# Altium footprint library Connector-PinHDR.PcbLib: 88 footprints (part 5 of 6)
Each footprint in its own frame and in the unit in brackets; x right, y up, seen from the top. Pads: shape width x height; smd on the part's side, far side on the other; paste and mask are expansions set on the pad; w line width, h text height; cw(c..) or ccw(c..) is an arc to the next point about the centre after c.
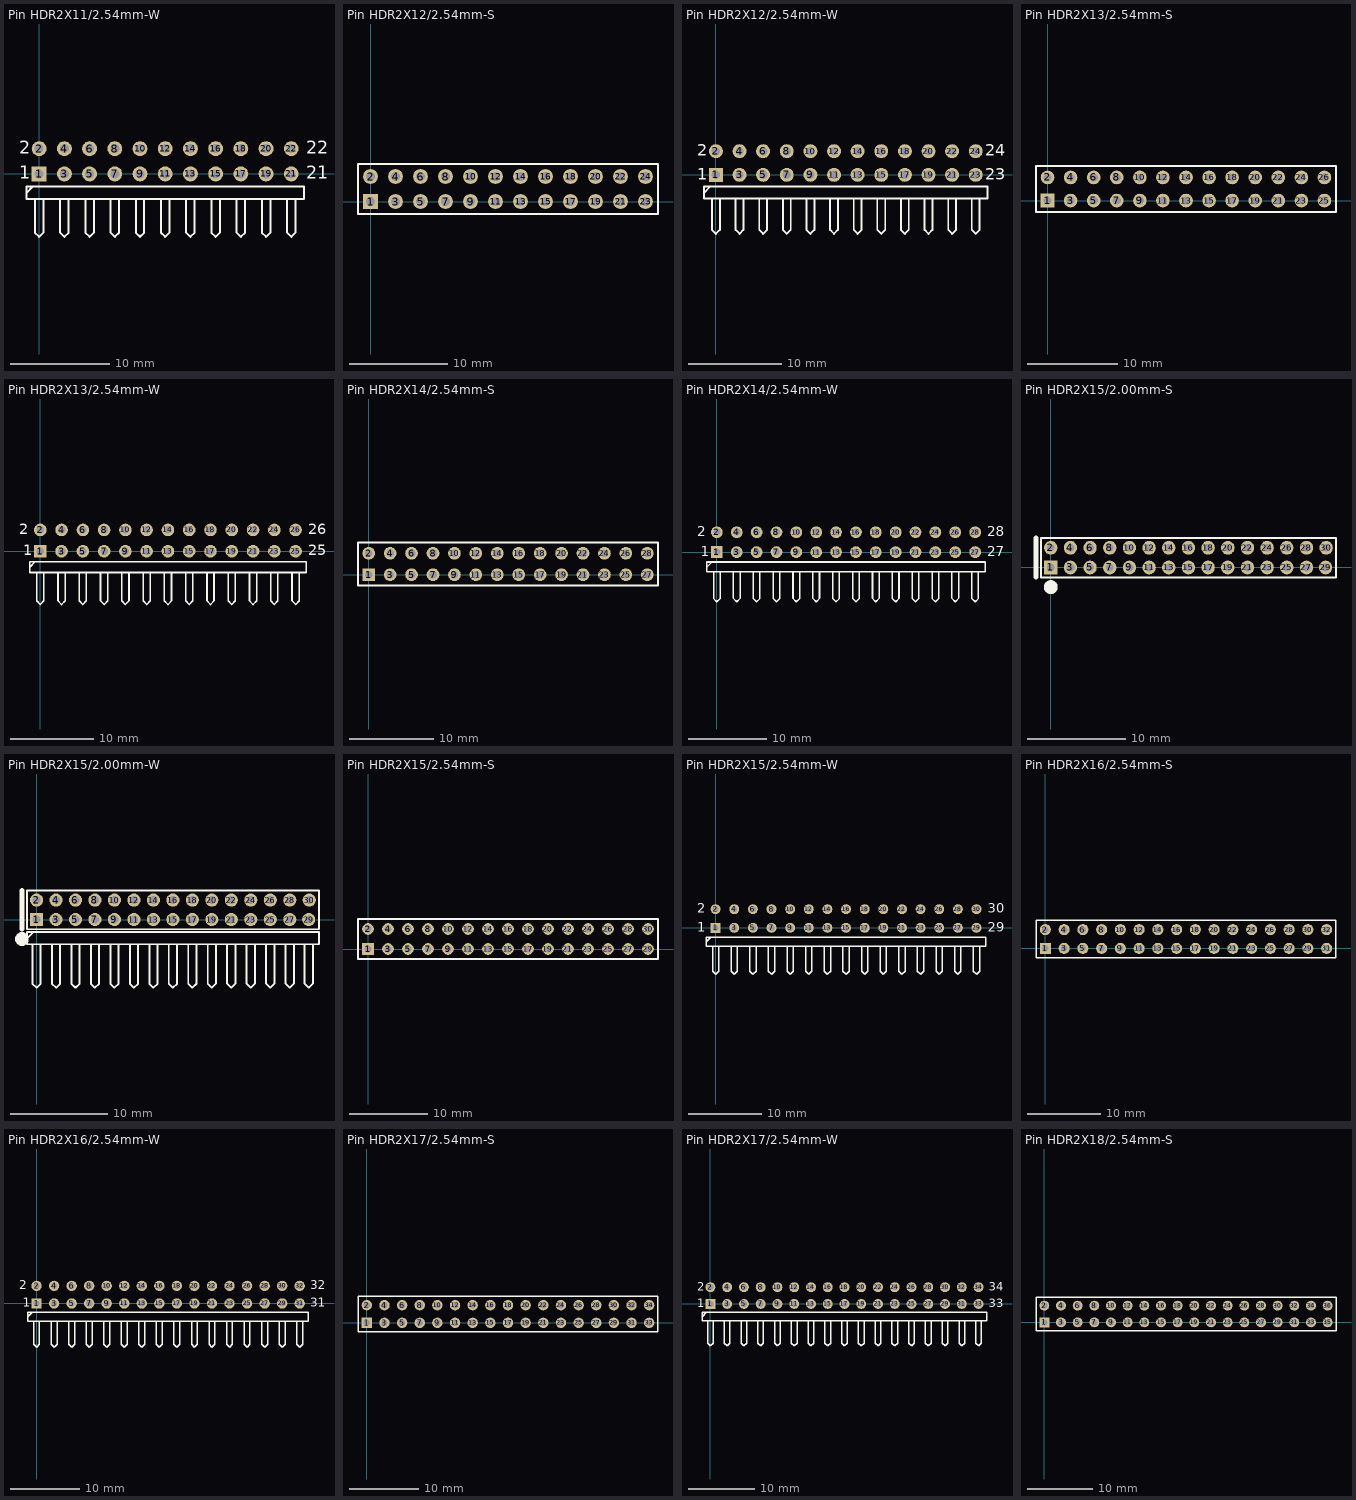
[diagram p4: the footprints below, top view; thin cyan lines are the x and y axes]

## Pin HDR2X11/2.54mm-W [mm] "Connector; Header; 11x2 Position; Right Angle"
pads (22):
  rect 1.5x1.5 hole 0.9: 1(0,0)
  round 1.5 hole 0.9: 2(0,2.54) 3(2.54,0) 4(2.54,2.54) 5(5.08,0) 6(5.08,2.54) 7(7.62,0) 8(7.62,2.54) 9(10.16,0) 10(10.16,2.54) 11(12.7,0) 12(12.7,2.54) 13(15.24,0) 14(15.24,2.54) 15(17.78,0) 16(17.78,2.54) 17(20.32,0) 18(20.32,2.54) 19(22.86,0) 20(22.86,2.54) 21(25.4,0) 22(25.4,2.54)
Top Overlay:
  lines w0.2: -1.27,-1.905 -0.635,-1.27 ; -0.423,-2.54 -0.423,-5.927 0,-6.35 0.423,-5.927 0.423,-2.54 ; 2.117,-2.54 2.117,-5.927 2.54,-6.35 2.963,-5.927 2.963,-2.54 ; 4.657,-2.54 4.657,-5.927 5.08,-6.35 5.503,-5.927 5.503,-2.54 ; 7.197,-2.54 7.197,-5.927 7.62,-6.35 8.043,-5.927 8.043,-2.54 ; 9.737,-2.54 9.737,-5.927 10.16,-6.35 10.583,-5.927 10.583,-2.54 ; 12.277,-2.54 12.277,-5.927 12.7,-6.35 13.123,-5.927 13.123,-2.54 ; 14.817,-2.54 14.817,-5.927 15.24,-6.35 15.663,-5.927 15.663,-2.54 ; 17.357,-2.54 17.357,-5.927 17.78,-6.35 18.203,-5.927 18.203,-2.54 ; 19.897,-2.54 19.897,-5.927 20.32,-6.35 20.743,-5.927 20.743,-2.54 ; 22.437,-2.54 22.437,-5.927 22.86,-6.35 23.283,-5.927 23.283,-2.54 ; 24.977,-2.54 24.977,-5.927 25.4,-6.35 25.823,-5.927 25.823,-2.54 ; -1.27,-2.54 -1.27,-1.27 26.67,-1.27 26.67,-2.54 -1.27,-2.54
  text "22" at 26.924,2.032 h1.27
  text "21" at 26.924,-0.508 h1.27
  text "1" at -2.032,-0.508 h1.27
  text "2" at -2.032,2.032 h1.27
3D body "hdr2_11.stp": height 5.08, standoff -1, extent -1.27,-10.001 26.67,2.889

## Pin HDR2X12/2.54mm-S [mm] "Connector; Header; 12x2 Position"
pads (24):
  rect 1.5x1.5 hole 0.9: 1(0,0)
  round 1.5 hole 0.9: 2(0,2.54) 3(2.54,0) 4(2.54,2.54) 5(5.08,0) 6(5.08,2.54) 7(7.62,0) 8(7.62,2.54) 9(10.16,0) 10(10.16,2.54) 11(12.7,0) 12(12.7,2.54) 13(15.24,0) 14(15.24,2.54) 15(17.78,0) 16(17.78,2.54) 17(20.32,0) 18(20.32,2.54) 19(22.86,0) 20(22.86,2.54) 21(25.4,0) 22(25.4,2.54) 23(27.94,0) 24(27.94,2.54)
Top Overlay:
  lines w0.2: -1.27,-1.27 -1.27,3.81 29.21,3.81 29.21,-1.27 -1.27,-1.27
3D body "HEADER.STEP": height 7.58, standoff -2.94, extent 26.67,1.27 29.21,3.81
3D body "HEADER.STEP": height 7.58, standoff -2.94, extent 26.67,-1.27 29.21,1.27
3D body "HEADER.STEP": height 7.58, standoff -2.94, extent 24.13,1.27 26.67,3.81
3D body "HEADER.STEP": height 7.58, standoff -2.94, extent 24.13,-1.27 26.67,1.27
3D body "HEADER.STEP": height 7.58, standoff -2.94, extent 21.59,1.27 24.13,3.81
3D body "HEADER.STEP": height 7.58, standoff -2.94, extent 21.59,-1.27 24.13,1.27
3D body "HEADER.STEP": height 7.58, standoff -2.94, extent 19.05,1.27 21.59,3.81
3D body "HEADER.STEP": height 7.58, standoff -2.94, extent 19.05,-1.27 21.59,1.27
3D body "HEADER.STEP": height 7.58, standoff -2.94, extent 16.51,1.27 19.05,3.81
3D body "HEADER.STEP": height 7.58, standoff -2.94, extent 16.51,-1.27 19.05,1.27
3D body "HEADER.STEP": height 7.58, standoff -2.94, extent 13.97,1.27 16.51,3.81
3D body "HEADER.STEP": height 7.58, standoff -2.94, extent 13.97,-1.27 16.51,1.27
3D body "HEADER.STEP": height 7.58, standoff -2.94, extent 11.43,1.27 13.97,3.81
3D body "HEADER.STEP": height 7.58, standoff -2.94, extent 11.43,-1.27 13.97,1.27
3D body "HEADER.STEP": height 7.58, standoff -2.94, extent 8.89,1.27 11.43,3.81
3D body "HEADER.STEP": height 7.58, standoff -2.94, extent 8.89,-1.27 11.43,1.27
3D body "HEADER.STEP": height 7.58, standoff -2.94, extent 6.35,1.27 8.89,3.81
3D body "HEADER.STEP": height 7.58, standoff -2.94, extent 6.35,-1.27 8.89,1.27
3D body "HEADER.STEP": height 7.58, standoff -2.94, extent 3.81,1.27 6.35,3.81
3D body "HEADER.STEP": height 7.58, standoff -2.94, extent 3.81,-1.27 6.35,1.27
3D body "HEADER.STEP": height 7.58, standoff -2.94, extent 1.27,1.27 3.81,3.81
3D body "HEADER.STEP": height 7.58, standoff -2.94, extent 1.27,-1.27 3.81,1.27
3D body "HEADER.STEP": height 7.58, standoff -2.94, extent -1.27,1.27 1.27,3.81
3D body "HEADER.STEP": height 7.58, standoff -2.94, extent -1.27,-1.27 1.27,1.27

## Pin HDR2X12/2.54mm-W [mm] "Connector; Header; 12x2 Position; Right Angle"
pads (24):
  rect 1.5x1.5 hole 0.9: 1(0,0)
  round 1.5 hole 0.9: 2(0,2.54) 3(2.54,0) 4(2.54,2.54) 5(5.08,0) 6(5.08,2.54) 7(7.62,0) 8(7.62,2.54) 9(10.16,0) 10(10.16,2.54) 11(12.7,0) 12(12.7,2.54) 13(15.24,0) 14(15.24,2.54) 15(17.78,0) 16(17.78,2.54) 17(20.32,0) 18(20.32,2.54) 19(22.86,0) 20(22.86,2.54) 21(25.4,0) 22(25.4,2.54) 23(27.94,0) 24(27.94,2.54)
Top Overlay:
  lines w0.2: -1.27,-1.905 -0.635,-1.27 ; -0.423,-2.54 -0.423,-5.927 0,-6.35 0.423,-5.927 0.423,-2.54 ; 2.117,-2.54 2.117,-5.927 2.54,-6.35 2.963,-5.927 2.963,-2.54 ; 4.657,-2.54 4.657,-5.927 5.08,-6.35 5.503,-5.927 5.503,-2.54 ; 7.197,-2.54 7.197,-5.927 7.62,-6.35 8.043,-5.927 8.043,-2.54 ; 9.737,-2.54 9.737,-5.927 10.16,-6.35 10.583,-5.927 10.583,-2.54 ; 12.277,-2.54 12.277,-5.927 12.7,-6.35 13.123,-5.927 13.123,-2.54 ; 14.817,-2.54 14.817,-5.927 15.24,-6.35 15.663,-5.927 15.663,-2.54 ; 17.357,-2.54 17.357,-5.927 17.78,-6.35 18.203,-5.927 18.203,-2.54 ; 19.897,-2.54 19.897,-5.927 20.32,-6.35 20.743,-5.927 20.743,-2.54 ; 22.437,-2.54 22.437,-5.927 22.86,-6.35 23.283,-5.927 23.283,-2.54 ; 24.977,-2.54 24.977,-5.927 25.4,-6.35 25.823,-5.927 25.823,-2.54 ; 27.517,-2.54 27.517,-5.927 27.94,-6.35 28.363,-5.927 28.363,-2.54 ; -1.27,-2.54 29.21,-2.54 29.21,-1.27 -1.27,-1.27 -1.27,-2.54
  text "1" at -2.032,-0.508 h1.27
  text "2" at -2.032,2.032 h1.27
  text "23" at 28.956,-0.508 h1.27
  text "24" at 28.956,2.032 h1.27
3D body "hdr2_12.stp": height 5.08, standoff -1, extent -1.27,-10.001 29.21,2.889

## Pin HDR2X13/2.54mm-S [mm] "Connector; Header; 13x2 Position"
pads (26):
  rect 1.5x1.5 hole 0.9: 1(0,0)
  round 1.5 hole 0.9: 2(0,2.54) 3(2.54,0) 4(2.54,2.54) 5(5.08,0) 6(5.08,2.54) 7(7.62,0) 8(7.62,2.54) 9(10.16,0) 10(10.16,2.54) 11(12.7,0) 12(12.7,2.54) 13(15.24,0) 14(15.24,2.54) 15(17.78,0) 16(17.78,2.54) 17(20.32,0) 18(20.32,2.54) 19(22.86,0) 20(22.86,2.54) 21(25.4,0) 22(25.4,2.54) 23(27.94,0) 24(27.94,2.54) 25(30.48,0) 26(30.48,2.54)
Top Overlay:
  lines w0.2: -1.27,-1.27 -1.27,3.81 31.75,3.81 31.75,-1.27 -1.27,-1.27
3D body "HEADER.STEP": height 7.58, standoff -2.94, extent -1.27,1.27 1.27,3.81
3D body "HEADER.STEP": height 7.58, standoff -2.94, extent -1.27,-1.27 1.27,1.27
3D body "HEADER.STEP": height 7.58, standoff -2.94, extent 1.27,1.27 3.81,3.81
3D body "HEADER.STEP": height 7.58, standoff -2.94, extent 1.27,-1.27 3.81,1.27
3D body "HEADER.STEP": height 7.58, standoff -2.94, extent 3.81,1.27 6.35,3.81
3D body "HEADER.STEP": height 7.58, standoff -2.94, extent 3.81,-1.27 6.35,1.27
3D body "HEADER.STEP": height 7.58, standoff -2.94, extent 6.35,1.27 8.89,3.81
3D body "HEADER.STEP": height 7.58, standoff -2.94, extent 6.35,-1.27 8.89,1.27
3D body "HEADER.STEP": height 7.58, standoff -2.94, extent 8.89,1.27 11.43,3.81
3D body "HEADER.STEP": height 7.58, standoff -2.94, extent 8.89,-1.27 11.43,1.27
3D body "HEADER.STEP": height 7.58, standoff -2.94, extent 11.43,1.27 13.97,3.81
3D body "HEADER.STEP": height 7.58, standoff -2.94, extent 11.43,-1.27 13.97,1.27
3D body "HEADER.STEP": height 7.58, standoff -2.94, extent 13.97,1.27 16.51,3.81
3D body "HEADER.STEP": height 7.58, standoff -2.94, extent 13.97,-1.27 16.51,1.27
3D body "HEADER.STEP": height 7.58, standoff -2.94, extent 16.51,1.27 19.05,3.81
3D body "HEADER.STEP": height 7.58, standoff -2.94, extent 16.51,-1.27 19.05,1.27
3D body "HEADER.STEP": height 7.58, standoff -2.94, extent 19.05,1.27 21.59,3.81
3D body "HEADER.STEP": height 7.58, standoff -2.94, extent 19.05,-1.27 21.59,1.27
3D body "HEADER.STEP": height 7.58, standoff -2.94, extent 21.59,1.27 24.13,3.81
3D body "HEADER.STEP": height 7.58, standoff -2.94, extent 21.59,-1.27 24.13,1.27
3D body "HEADER.STEP": height 7.58, standoff -2.94, extent 24.13,1.27 26.67,3.81
3D body "HEADER.STEP": height 7.58, standoff -2.94, extent 24.13,-1.27 26.67,1.27
3D body "HEADER.STEP": height 7.58, standoff -2.94, extent 26.67,1.27 29.21,3.81
3D body "HEADER.STEP": height 7.58, standoff -2.94, extent 26.67,-1.27 29.21,1.27
3D body "HEADER.STEP": height 7.58, standoff -2.94, extent 29.21,1.27 31.75,3.81
3D body "HEADER.STEP": height 7.58, standoff -2.94, extent 29.21,-1.27 31.75,1.27

## Pin HDR2X13/2.54mm-W [mm] "Connector; Header; 13x2 Position; Right Angle"
pads (26):
  rect 1.5x1.5 hole 0.9: 1(0,0)
  round 1.5 hole 0.9: 2(0,2.54) 3(2.54,0) 4(2.54,2.54) 5(5.08,0) 6(5.08,2.54) 7(7.62,0) 8(7.62,2.54) 9(10.16,0) 10(10.16,2.54) 11(12.7,0) 12(12.7,2.54) 13(15.24,0) 14(15.24,2.54) 15(17.78,0) 16(17.78,2.54) 17(20.32,0) 18(20.32,2.54) 19(22.86,0) 20(22.86,2.54) 21(25.4,0) 22(25.4,2.54) 23(27.94,0) 24(27.94,2.54) 25(30.48,0) 26(30.48,2.54)
Top Overlay:
  lines w0.2: -1.27,-1.905 -0.635,-1.27 ; -0.423,-2.54 -0.423,-5.927 0,-6.35 0.423,-5.927 0.423,-2.54 ; 2.117,-2.54 2.117,-5.927 2.54,-6.35 2.963,-5.927 2.963,-2.54 ; 4.657,-2.54 4.657,-5.927 5.08,-6.35 5.503,-5.927 5.503,-2.54 ; 7.197,-2.54 7.197,-5.927 7.62,-6.35 8.043,-5.927 8.043,-2.54 ; 9.737,-2.54 9.737,-5.927 10.16,-6.35 10.583,-5.927 10.583,-2.54 ; 12.277,-2.54 12.277,-5.927 12.7,-6.35 13.123,-5.927 13.123,-2.54 ; 14.817,-2.54 14.817,-5.927 15.24,-6.35 15.663,-5.927 15.663,-2.54 ; 17.357,-2.54 17.357,-5.927 17.78,-6.35 18.203,-5.927 18.203,-2.54 ; 19.897,-2.54 19.897,-5.927 20.32,-6.35 20.743,-5.927 20.743,-2.54 ; 22.437,-2.54 22.437,-5.927 22.86,-6.35 23.283,-5.927 23.283,-2.54 ; 24.977,-2.54 24.977,-5.927 25.4,-6.35 25.823,-5.927 25.823,-2.54 ; 27.517,-2.54 27.517,-5.927 27.94,-6.35 28.363,-5.927 28.363,-2.54 ; 30.057,-2.54 30.057,-5.927 30.48,-6.35 30.903,-5.927 30.903,-2.54 ; -1.27,-2.54 -1.27,-1.27 31.75,-1.27 31.75,-2.54 -1.27,-2.54
  text "26" at 32.004,2.032 h1.27
  text "25" at 32.004,-0.508 h1.27
  text "1" at -2.032,-0.508 h1.27
  text "2" at -2.54,2.032 h1.27
3D body "hdr2_13.stp": height 5.08, standoff -1, extent -1.27,-9.969 31.75,2.921

## Pin HDR2X14/2.54mm-S [mm] "Connector; Header; 14x2 Position"
pads (28):
  rect 1.5x1.5 hole 0.9: 1(0,0)
  round 1.5 hole 0.9: 2(0,2.54) 3(2.54,0) 4(2.54,2.54) 5(5.08,0) 6(5.08,2.54) 7(7.62,0) 8(7.62,2.54) 9(10.16,0) 10(10.16,2.54) 11(12.7,0) 12(12.7,2.54) 13(15.24,0) 14(15.24,2.54) 15(17.78,0) 16(17.78,2.54) 17(20.32,0) 18(20.32,2.54) 19(22.86,0) 20(22.86,2.54) 21(25.4,0) 22(25.4,2.54) 23(27.94,0) 24(27.94,2.54) 25(30.48,0) 26(30.48,2.54) 27(33.02,0) 28(33.02,2.54)
Top Overlay:
  lines w0.2: -1.27,-1.27 -1.27,3.81 34.29,3.81 34.29,-1.27 -1.27,-1.27
3D body "HEADER.STEP": height 7.58, standoff -2.94, extent 31.75,1.27 34.29,3.81
3D body "HEADER.STEP": height 7.58, standoff -2.94, extent 29.21,1.27 31.75,3.81
3D body "HEADER.STEP": height 7.58, standoff -2.94, extent 31.75,-1.27 34.29,1.27
3D body "HEADER.STEP": height 7.58, standoff -2.94, extent 29.21,-1.27 31.75,1.27
3D body "HEADER.STEP": height 7.58, standoff -2.94, extent 26.67,1.27 29.21,3.81
3D body "HEADER.STEP": height 7.58, standoff -2.94, extent 24.13,1.27 26.67,3.81
3D body "HEADER.STEP": height 7.58, standoff -2.94, extent 21.59,1.27 24.13,3.81
3D body "HEADER.STEP": height 7.58, standoff -2.94, extent 19.05,1.27 21.59,3.81
3D body "HEADER.STEP": height 7.58, standoff -2.94, extent 26.67,-1.27 29.21,1.27
3D body "HEADER.STEP": height 7.58, standoff -2.94, extent 24.13,-1.27 26.67,1.27
3D body "HEADER.STEP": height 7.58, standoff -2.94, extent 21.59,-1.27 24.13,1.27
3D body "HEADER.STEP": height 7.58, standoff -2.94, extent 19.05,-1.27 21.59,1.27
3D body "HEADER.STEP": height 7.58, standoff -2.94, extent 16.51,1.27 19.05,3.81
3D body "HEADER.STEP": height 7.58, standoff -2.94, extent 13.97,1.27 16.51,3.81
3D body "HEADER.STEP": height 7.58, standoff -2.94, extent 11.43,1.27 13.97,3.81
3D body "HEADER.STEP": height 7.58, standoff -2.94, extent 8.89,1.27 11.43,3.81
3D body "HEADER.STEP": height 7.58, standoff -2.94, extent 16.51,-1.27 19.05,1.27
3D body "HEADER.STEP": height 7.58, standoff -2.94, extent 13.97,-1.27 16.51,1.27
3D body "HEADER.STEP": height 7.58, standoff -2.94, extent 11.43,-1.27 13.97,1.27
3D body "HEADER.STEP": height 7.58, standoff -2.94, extent 8.89,-1.27 11.43,1.27
3D body "HEADER.STEP": height 7.58, standoff -2.94, extent 6.35,1.27 8.89,3.81
3D body "HEADER.STEP": height 7.58, standoff -2.94, extent 3.81,1.27 6.35,3.81
3D body "HEADER.STEP": height 7.58, standoff -2.94, extent 1.27,1.27 3.81,3.81
3D body "HEADER.STEP": height 7.58, standoff -2.94, extent -1.27,1.27 1.27,3.81
3D body "HEADER.STEP": height 7.58, standoff -2.94, extent 6.35,-1.27 8.89,1.27
3D body "HEADER.STEP": height 7.58, standoff -2.94, extent 3.81,-1.27 6.35,1.27
3D body "HEADER.STEP": height 7.58, standoff -2.94, extent 1.27,-1.27 3.81,1.27
3D body "HEADER.STEP": height 7.58, standoff -2.94, extent -1.27,-1.27 1.27,1.27

## Pin HDR2X14/2.54mm-W [mm] "Connector; Header; 14x2 Position; Right Angle"
pads (28):
  rect 1.5x1.5 hole 0.9: 1(0,0)
  round 1.5 hole 0.9: 2(0,2.54) 3(2.54,0) 4(2.54,2.54) 5(5.08,0) 6(5.08,2.54) 7(7.62,0) 8(7.62,2.54) 9(10.16,0) 10(10.16,2.54) 11(12.7,0) 12(12.7,2.54) 13(15.24,0) 14(15.24,2.54) 15(17.78,0) 16(17.78,2.54) 17(20.32,0) 18(20.32,2.54) 19(22.86,0) 20(22.86,2.54) 21(25.4,0) 22(25.4,2.54) 23(27.94,0) 24(27.94,2.54) 25(30.48,0) 26(30.48,2.54) 27(33.02,0) 28(33.02,2.54)
Top Overlay:
  lines w0.2: -1.27,-1.905 -0.635,-1.27 ; -0.423,-2.54 -0.423,-5.927 0,-6.35 0.423,-5.927 0.423,-2.54 ; 2.117,-2.54 2.117,-5.927 2.54,-6.35 2.963,-5.927 2.963,-2.54 ; 4.657,-2.54 4.657,-5.927 5.08,-6.35 5.503,-5.927 5.503,-2.54 ; 7.197,-2.54 7.197,-5.927 7.62,-6.35 8.043,-5.927 8.043,-2.54 ; 9.737,-2.54 9.737,-5.927 10.16,-6.35 10.583,-5.927 10.583,-2.54 ; 12.277,-2.54 12.277,-5.927 12.7,-6.35 13.123,-5.927 13.123,-2.54 ; 14.817,-2.54 14.817,-5.927 15.24,-6.35 15.663,-5.927 15.663,-2.54 ; 17.357,-2.54 17.357,-5.927 17.78,-6.35 18.203,-5.927 18.203,-2.54 ; 19.897,-2.54 19.897,-5.927 20.32,-6.35 20.743,-5.927 20.743,-2.54 ; 22.437,-2.54 22.437,-5.927 22.86,-6.35 23.283,-5.927 23.283,-2.54 ; 24.977,-2.54 24.977,-5.927 25.4,-6.35 25.823,-5.927 25.823,-2.54 ; 27.517,-2.54 27.517,-5.927 27.94,-6.35 28.363,-5.927 28.363,-2.54 ; 30.057,-2.54 30.057,-5.927 30.48,-6.35 30.903,-5.927 30.903,-2.54 ; 32.597,-2.54 32.597,-5.927 33.02,-6.35 33.443,-5.927 33.443,-2.54 ; -1.27,-2.54 -1.27,-1.27 34.29,-1.27 34.29,-2.54 -1.27,-2.54
  text "28" at 34.544,2.032 h1.27
  text "27" at 34.544,-0.508 h1.27
  text "1" at -2.032,-0.508 h1.27
  text "2" at -2.54,2.032 h1.27
3D body "hdr2_14.stp": height 5.08, standoff -1, extent -1.27,-9.969 34.29,2.921

## Pin HDR2X15/2.00mm-S [mm] "Connector; Header; 15x2 Position"
pads (30):
  rect 1.35x1.4 hole 0.8: 1(0,0)
  oval 1.35x1.4 hole 0.8: 2(0,2) 3(2,0) 4(2,2) 5(4,0) 6(4,2) 7(6,0) 8(6,2) 9(8,0) 10(8,2) 11(10,0) 12(10,2) 13(12,0) 14(12,2) 15(14,0) 16(14,2) 17(16,0) 18(16,2) 19(18,0) 21(20,0) 22(20,2) 23(22,0) 24(22,2) 25(24,0) 26(24,2) 27(26,0) 28(26,2) 29(27.94,0) 30(28,2)
  round 1.4 hole 0.8: 20(18,2)
Top Overlay:
  circle w0.8: c0,-2 r0.3
  lines w0.2: -1,-1 29,-1 29,3 -1,3 -1,-1
  lines w0.406: -1.5,-1 -1.5,3
  lines w0.5: -1.5,-1 -1.5,3
Bottom Overlay:
  text "V" at 0.64,4.084 h2
  text "V" at 0.64,-0.916 h2
  text "V" at 2.64,-0.916 h2
  text "G" at 2.641,4.091 h2
Top Value:
  text "'.Comment'" at 9.047,0.634 h2
Top Designator:
  text "'.Designator'" at 7.904,0.714 h2
3D body "x4621wv-2x15i-c40d28.stp": height 6, standoff -2.8, extent -1,-1 29,3

## Pin HDR2X15/2.00mm-W [mm] "Connector; Header; 15x2 Position Right Angle"
pads (30):
  rect 1.35x1.35 hole 0.8: 1(0,0)
  round 1.35 hole 0.8: 2(0,2) 3(2,0) 4(2,2) 5(4,0) 6(4,2) 7(6,0) 8(6,2) 9(8,0) 10(8,2) 11(10,0) 12(10,2) 13(12,0) 14(12,2) 15(14,0) 16(14,2) 17(16,0) 18(16,2) 19(18,0) 20(18,2) 21(20,0) 22(20,2) 23(22,0) 24(22,2) 25(24,0) 26(24,2) 27(26,0) 28(26,2) 29(27.94,0) 30(28,2)
Top Overlay:
  circle w0.8: c-1.5,-2 r0.3
  lines w0.2: -0.944,-1.914 -0.309,-1.279 ; -0.423,-5.927 -0.423,-2.54 ; -0.423,-3.19 -0.423,-6.577 0,-7 0.423,-6.577 0.423,-3.19 ; 0.423,-5.927 0.423,-2.54 ; 1.577,-2.6 1.577,-6.577 2,-7 2.423,-6.577 2.423,-2.6 ; 3.577,-2.6 3.577,-6.577 4,-7 4.423,-6.577 4.423,-2.6 ; 5.577,-2.6 5.577,-6.577 6,-7 6.423,-6.577 6.423,-2.6 ; 7.577,-2.6 7.577,-6.577 8,-7 8.423,-6.577 8.423,-2.6 ; 9.577,-2.6 9.577,-6.577 10,-7 10.423,-6.577 10.423,-2.6 ; 11.577,-2.6 11.577,-6.577 12,-7 12.423,-6.577 12.423,-2.6 ; 13.577,-2.6 13.577,-6.577 14,-7 14.423,-6.577 14.423,-2.6 ; 15.577,-2.6 15.577,-6.577 16,-7 16.423,-6.577 16.423,-2.6 ; 17.577,-2.6 17.577,-6.577 18,-7 18.423,-6.577 18.423,-2.6 ; 19.577,-2.6 19.577,-6.577 20,-7 20.423,-6.577 20.423,-2.6 ; 21.577,-2.6 21.577,-6.577 22,-7 22.423,-6.577 22.423,-2.6 ; 23.577,-2.6 23.577,-6.577 24,-7 24.423,-6.577 24.423,-2.6 ; 25.577,-2.6 25.577,-6.577 26,-7 26.423,-6.577 26.423,-2.6 ; 27.517,-2.6 27.517,-6.577 27.94,-7 28.363,-6.577 28.363,-2.6 ; 29,-2.54 -1,-2.54 -1,-1.27 29,-1.27 29,-2.517 ; -1,-1 -1,3 29,3 29,-1 -1,-1
  lines w0.406: -1.5,-1 -1.5,3
  lines w0.5: -1.5,-1 -1.5,3
Bottom Overlay:
  text "G" at 2.641,4.091 h2
  text "V" at 2.64,-0.916 h2
  text "V" at 0.64,-0.916 h2
  text "V" at 0.64,4.084 h2
Top Value:
  text "'.Comment'" at 9.047,0.634 h2
Top Designator:
  text "'.Designator'" at 7.904,0.714 h2
3D body "弯插,P=2mm.step": height 4.22, standoff -2.58, extent -1,-7.11 29,2.29

## Pin HDR2X15/2.54mm-S [mm] "Connector; Header; 15x2 Position"
pads (30):
  rect 1.5x1.5 hole 0.9: 1(0,0)
  round 1.5 hole 0.9: 2(0,2.54) 3(2.54,0) 4(2.54,2.54) 5(5.08,0) 6(5.08,2.54) 7(7.62,0) 8(7.62,2.54) 9(10.16,0) 10(10.16,2.54) 11(12.7,0) 12(12.7,2.54) 13(15.24,0) 14(15.24,2.54) 15(17.78,0) 16(17.78,2.54) 17(20.32,0) 18(20.32,2.54) 19(22.86,0) 20(22.86,2.54) 21(25.4,0) 22(25.4,2.54) 23(27.94,0) 24(27.94,2.54) 25(30.48,0) 26(30.48,2.54) 27(33.02,0) 28(33.02,2.54) 29(35.56,0) 30(35.56,2.54)
Top Overlay:
  lines w0.2: -1.27,-1.27 36.83,-1.27 36.83,3.81 -1.27,3.81 -1.27,-1.27
3D body "HEADER.STEP": height 7.58, standoff -2.94, extent 34.29,1.27 36.83,3.81
3D body "HEADER.STEP": height 7.58, standoff -2.94, extent 31.75,1.27 34.29,3.81
3D body "HEADER.STEP": height 7.58, standoff -2.94, extent 29.21,1.27 31.75,3.81
3D body "HEADER.STEP": height 7.58, standoff -2.94, extent 34.29,-1.27 36.83,1.27
3D body "HEADER.STEP": height 7.58, standoff -2.94, extent 31.75,-1.27 34.29,1.27
3D body "HEADER.STEP": height 7.58, standoff -2.94, extent 29.21,-1.27 31.75,1.27
3D body "HEADER.STEP": height 7.58, standoff -2.94, extent 26.67,1.27 29.21,3.81
3D body "HEADER.STEP": height 7.58, standoff -2.94, extent 24.13,1.27 26.67,3.81
3D body "HEADER.STEP": height 7.58, standoff -2.94, extent 21.59,1.27 24.13,3.81
3D body "HEADER.STEP": height 7.58, standoff -2.94, extent 19.05,1.27 21.59,3.81
3D body "HEADER.STEP": height 7.58, standoff -2.94, extent 26.67,-1.27 29.21,1.27
3D body "HEADER.STEP": height 7.58, standoff -2.94, extent 24.13,-1.27 26.67,1.27
3D body "HEADER.STEP": height 7.58, standoff -2.94, extent 21.59,-1.27 24.13,1.27
3D body "HEADER.STEP": height 7.58, standoff -2.94, extent 19.05,-1.27 21.59,1.27
3D body "HEADER.STEP": height 7.58, standoff -2.94, extent 16.51,1.27 19.05,3.81
3D body "HEADER.STEP": height 7.58, standoff -2.94, extent 13.97,1.27 16.51,3.81
3D body "HEADER.STEP": height 7.58, standoff -2.94, extent 11.43,1.27 13.97,3.81
3D body "HEADER.STEP": height 7.58, standoff -2.94, extent 8.89,1.27 11.43,3.81
3D body "HEADER.STEP": height 7.58, standoff -2.94, extent 16.51,-1.27 19.05,1.27
3D body "HEADER.STEP": height 7.58, standoff -2.94, extent 13.97,-1.27 16.51,1.27
3D body "HEADER.STEP": height 7.58, standoff -2.94, extent 11.43,-1.27 13.97,1.27
3D body "HEADER.STEP": height 7.58, standoff -2.94, extent 8.89,-1.27 11.43,1.27
3D body "HEADER.STEP": height 7.58, standoff -2.94, extent 6.35,1.27 8.89,3.81
3D body "HEADER.STEP": height 7.58, standoff -2.94, extent 3.81,1.27 6.35,3.81
3D body "HEADER.STEP": height 7.58, standoff -2.94, extent 1.27,1.27 3.81,3.81
3D body "HEADER.STEP": height 7.58, standoff -2.94, extent -1.27,1.27 1.27,3.81
3D body "HEADER.STEP": height 7.58, standoff -2.94, extent 6.35,-1.27 8.89,1.27
3D body "HEADER.STEP": height 7.58, standoff -2.94, extent 3.81,-1.27 6.35,1.27
3D body "HEADER.STEP": height 7.58, standoff -2.94, extent 1.27,-1.27 3.81,1.27
3D body "HEADER.STEP": height 7.58, standoff -2.94, extent -1.27,-1.27 1.27,1.27

## Pin HDR2X15/2.54mm-W [mm] "Connector; Header; 15x2 Position; Right Angle"
pads (30):
  rect 1.35x1.35 hole 0.8: 1(0,0)
  round 1.35 hole 0.8: 2(0,2.54) 3(2.54,0) 4(2.54,2.54) 5(5.08,0) 6(5.08,2.54) 7(7.62,0) 8(7.62,2.54) 9(10.16,0) 10(10.16,2.54) 11(12.7,0) 12(12.7,2.54) 13(15.24,0) 14(15.24,2.54) 15(17.78,0) 16(17.78,2.54) 17(20.32,0) 18(20.32,2.54) 19(22.86,0) 20(22.86,2.54) 21(25.4,0) 22(25.4,2.54) 23(27.94,0) 24(27.94,2.54) 25(30.48,0) 26(30.48,2.54) 27(33.02,0) 28(33.02,2.54) 29(35.56,0) 30(35.56,2.54)
Top Overlay:
  lines w0.2: -1.27,-1.905 -0.635,-1.27 ; -0.423,-2.54 -0.423,-5.927 0,-6.35 0.423,-5.927 0.423,-2.54 ; 2.117,-2.54 2.117,-5.927 2.54,-6.35 2.963,-5.927 2.963,-2.54 ; 4.657,-2.54 4.657,-5.927 5.08,-6.35 5.503,-5.927 5.503,-2.54 ; 7.197,-2.54 7.197,-5.927 7.62,-6.35 8.043,-5.927 8.043,-2.54 ; 9.737,-2.54 9.737,-5.927 10.16,-6.35 10.583,-5.927 10.583,-2.54 ; 12.277,-2.54 12.277,-5.927 12.7,-6.35 13.123,-5.927 13.123,-2.54 ; 14.817,-2.54 14.817,-5.927 15.24,-6.35 15.663,-5.927 15.663,-2.54 ; 17.357,-2.54 17.357,-5.927 17.78,-6.35 18.203,-5.927 18.203,-2.54 ; 19.897,-2.54 19.897,-5.927 20.32,-6.35 20.743,-5.927 20.743,-2.54 ; 22.437,-2.54 22.437,-5.927 22.86,-6.35 23.283,-5.927 23.283,-2.54 ; 24.977,-2.54 24.977,-5.927 25.4,-6.35 25.823,-5.927 25.823,-2.54 ; 27.517,-2.54 27.517,-5.927 27.94,-6.35 28.363,-5.927 28.363,-2.54 ; 30.057,-2.54 30.057,-5.927 30.48,-6.35 30.903,-5.927 30.903,-2.54 ; 32.597,-2.54 32.597,-5.927 33.02,-6.35 33.443,-5.927 33.443,-2.54 ; 35.137,-2.54 35.137,-5.927 35.56,-6.35 35.983,-5.927 35.983,-2.54 ; -1.27,-2.54 -1.27,-1.27 36.83,-1.27 36.83,-2.54 -1.27,-2.54
  text "30" at 37.084,2.032 h1.27
  text "29" at 37.084,-0.508 h1.27
  text "1" at -2.54,-0.508 h1.27
  text "2" at -2.54,2.032 h1.27
3D body "hdr2_15.stp": height 5.08, standoff -1, extent -1.27,-9.969 36.83,2.921

## Pin HDR2X16/2.54mm-S [mm] "Connector; Header; 16x2 Position"
pads (32):
  rect 1.5x1.5 hole 0.9: 1(0,0)
  round 1.5 hole 0.9: 2(0,2.54) 3(2.54,0) 4(2.54,2.54) 5(5.08,0) 6(5.08,2.54) 7(7.62,0) 8(7.62,2.54) 9(10.16,0) 10(10.16,2.54) 11(12.7,0) 12(12.7,2.54) 13(15.24,0) 14(15.24,2.54) 15(17.78,0) 16(17.78,2.54) 17(20.32,0) 18(20.32,2.54) 19(22.86,0) 20(22.86,2.54) 21(25.4,0) 22(25.4,2.54) 23(27.94,0) 24(27.94,2.54) 25(30.48,0) 26(30.48,2.54) 27(33.02,0) 28(33.02,2.54) 29(35.56,0) 30(35.56,2.54) 31(38.1,0) 32(38.1,2.54)
Top Overlay:
  lines w0.2: -1.27,-1.27 -1.27,3.81 39.37,3.81 39.37,-1.27 -1.27,-1.27
3D body "HEADER.STEP": height 7.58, standoff -2.94, extent 36.83,1.27 39.37,3.81
3D body "HEADER.STEP": height 7.58, standoff -2.94, extent 34.29,1.27 36.83,3.81
3D body "HEADER.STEP": height 7.58, standoff -2.94, extent 31.75,1.27 34.29,3.81
3D body "HEADER.STEP": height 7.58, standoff -2.94, extent 29.21,1.27 31.75,3.81
3D body "HEADER.STEP": height 7.58, standoff -2.94, extent 36.83,-1.27 39.37,1.27
3D body "HEADER.STEP": height 7.58, standoff -2.94, extent 34.29,-1.27 36.83,1.27
3D body "HEADER.STEP": height 7.58, standoff -2.94, extent 31.75,-1.27 34.29,1.27
3D body "HEADER.STEP": height 7.58, standoff -2.94, extent 29.21,-1.27 31.75,1.27
3D body "HEADER.STEP": height 7.58, standoff -2.94, extent 26.67,1.27 29.21,3.81
3D body "HEADER.STEP": height 7.58, standoff -2.94, extent 24.13,1.27 26.67,3.81
3D body "HEADER.STEP": height 7.58, standoff -2.94, extent 21.59,1.27 24.13,3.81
3D body "HEADER.STEP": height 7.58, standoff -2.94, extent 19.05,1.27 21.59,3.81
3D body "HEADER.STEP": height 7.58, standoff -2.94, extent 26.67,-1.27 29.21,1.27
3D body "HEADER.STEP": height 7.58, standoff -2.94, extent 24.13,-1.27 26.67,1.27
3D body "HEADER.STEP": height 7.58, standoff -2.94, extent 21.59,-1.27 24.13,1.27
3D body "HEADER.STEP": height 7.58, standoff -2.94, extent 19.05,-1.27 21.59,1.27
3D body "HEADER.STEP": height 7.58, standoff -2.94, extent 16.51,1.27 19.05,3.81
3D body "HEADER.STEP": height 7.58, standoff -2.94, extent 13.97,1.27 16.51,3.81
3D body "HEADER.STEP": height 7.58, standoff -2.94, extent 11.43,1.27 13.97,3.81
3D body "HEADER.STEP": height 7.58, standoff -2.94, extent 8.89,1.27 11.43,3.81
3D body "HEADER.STEP": height 7.58, standoff -2.94, extent 16.51,-1.27 19.05,1.27
3D body "HEADER.STEP": height 7.58, standoff -2.94, extent 13.97,-1.27 16.51,1.27
3D body "HEADER.STEP": height 7.58, standoff -2.94, extent 11.43,-1.27 13.97,1.27
3D body "HEADER.STEP": height 7.58, standoff -2.94, extent 8.89,-1.27 11.43,1.27
3D body "HEADER.STEP": height 7.58, standoff -2.94, extent 6.35,1.27 8.89,3.81
3D body "HEADER.STEP": height 7.58, standoff -2.94, extent 3.81,1.27 6.35,3.81
3D body "HEADER.STEP": height 7.58, standoff -2.94, extent 1.27,1.27 3.81,3.81
3D body "HEADER.STEP": height 7.58, standoff -2.94, extent -1.27,1.27 1.27,3.81
3D body "HEADER.STEP": height 7.58, standoff -2.94, extent 6.35,-1.27 8.89,1.27
3D body "HEADER.STEP": height 7.58, standoff -2.94, extent 3.81,-1.27 6.35,1.27
3D body "HEADER.STEP": height 7.58, standoff -2.94, extent 1.27,-1.27 3.81,1.27
3D body "HEADER.STEP": height 7.58, standoff -2.94, extent -1.27,-1.27 1.27,1.27

## Pin HDR2X16/2.54mm-W [mm] "Connector; Header; 16x2 Position; Right Angle"
pads (32):
  rect 1.5x1.5 hole 0.9: 1(0,0)
  round 1.5 hole 0.9: 2(0,2.54) 3(2.54,0) 4(2.54,2.54) 5(5.08,0) 6(5.08,2.54) 7(7.62,0) 8(7.62,2.54) 9(10.16,0) 10(10.16,2.54) 11(12.7,0) 12(12.7,2.54) 13(15.24,0) 14(15.24,2.54) 15(17.78,0) 16(17.78,2.54) 17(20.32,0) 18(20.32,2.54) 19(22.86,0) 20(22.86,2.54) 21(25.4,0) 22(25.4,2.54) 23(27.94,0) 24(27.94,2.54) 25(30.48,0) 26(30.48,2.54) 27(33.02,0) 28(33.02,2.54) 29(35.56,0) 30(35.56,2.54) 31(38.1,0) 32(38.1,2.54)
Top Overlay:
  lines w0.2: -1.27,-1.905 -0.635,-1.27 ; -0.423,-2.54 -0.423,-5.927 0,-6.35 0.423,-5.927 0.423,-2.54 ; 2.117,-2.54 2.117,-5.927 2.54,-6.35 2.963,-5.927 2.963,-2.54 ; 4.657,-2.54 4.657,-5.927 5.08,-6.35 5.503,-5.927 5.503,-2.54 ; 7.197,-2.54 7.197,-5.927 7.62,-6.35 8.043,-5.927 8.043,-2.54 ; 9.737,-2.54 9.737,-5.927 10.16,-6.35 10.583,-5.927 10.583,-2.54 ; 12.277,-2.54 12.277,-5.927 12.7,-6.35 13.123,-5.927 13.123,-2.54 ; 14.817,-2.54 14.817,-5.927 15.24,-6.35 15.663,-5.927 15.663,-2.54 ; 17.357,-2.54 17.357,-5.927 17.78,-6.35 18.203,-5.927 18.203,-2.54 ; 19.897,-2.54 19.897,-5.927 20.32,-6.35 20.743,-5.927 20.743,-2.54 ; 22.437,-2.54 22.437,-5.927 22.86,-6.35 23.283,-5.927 23.283,-2.54 ; 24.977,-2.54 24.977,-5.927 25.4,-6.35 25.823,-5.927 25.823,-2.54 ; 27.517,-2.54 27.517,-5.927 27.94,-6.35 28.363,-5.927 28.363,-2.54 ; 30.057,-2.54 30.057,-5.927 30.48,-6.35 30.903,-5.927 30.903,-2.54 ; 32.597,-2.54 32.597,-5.927 33.02,-6.35 33.443,-5.927 33.443,-2.54 ; 35.137,-2.54 35.137,-5.927 35.56,-6.35 35.983,-5.927 35.983,-2.54 ; 37.677,-2.54 37.677,-5.927 38.1,-6.35 38.523,-5.927 38.523,-2.54 ; -1.27,-2.54 -1.27,-1.27 39.37,-1.27 39.37,-2.54 -1.27,-2.54
  text "2" at -2.54,2.032 h1.27
  text "1" at -2.032,-0.508 h1.27
  text "31" at 39.624,-0.508 h1.27
  text "32" at 39.624,2.032 h1.27
3D body "hdr2_16.stp": height 5.08, standoff -1, extent -1.27,-9.969 39.37,2.921

## Pin HDR2X17/2.54mm-S [mm] "Connector; Header; 17x2 Position"
pads (34):
  rect 1.5x1.5 hole 0.9: 1(0,0)
  round 1.5 hole 0.9: 2(0,2.54) 3(2.54,0) 4(2.54,2.54) 5(5.08,0) 6(5.08,2.54) 7(7.62,0) 8(7.62,2.54) 9(10.16,0) 10(10.16,2.54) 11(12.7,0) 12(12.7,2.54) 13(15.24,0) 14(15.24,2.54) 15(17.78,0) 16(17.78,2.54) 17(20.32,0) 18(20.32,2.54) 19(22.86,0) 20(22.86,2.54) 21(25.4,0) 22(25.4,2.54) 23(27.94,0) 24(27.94,2.54) 25(30.48,0) 26(30.48,2.54) 27(33.02,0) 28(33.02,2.54) 29(35.56,0) 30(35.56,2.54) 31(38.1,0) 32(38.1,2.54) 33(40.64,0) 34(40.64,2.54)
Top Overlay:
  lines w0.2: -1.27,-1.27 41.91,-1.27 41.91,3.81 -1.27,3.81 -1.27,-1.27
3D body "HEADER.STEP": height 7.58, standoff -2.94, extent -1.27,-1.27 1.27,1.27
3D body "HEADER.STEP": height 7.58, standoff -2.94, extent 1.27,-1.27 3.81,1.27
3D body "HEADER.STEP": height 7.58, standoff -2.94, extent 3.81,-1.27 6.35,1.27
3D body "HEADER.STEP": height 7.58, standoff -2.94, extent 6.35,-1.27 8.89,1.27
3D body "HEADER.STEP": height 7.58, standoff -2.94, extent -1.27,1.27 1.27,3.81
3D body "HEADER.STEP": height 7.58, standoff -2.94, extent 1.27,1.27 3.81,3.81
3D body "HEADER.STEP": height 7.58, standoff -2.94, extent 3.81,1.27 6.35,3.81
3D body "HEADER.STEP": height 7.58, standoff -2.94, extent 6.35,1.27 8.89,3.81
3D body "HEADER.STEP": height 7.58, standoff -2.94, extent 8.89,-1.27 11.43,1.27
3D body "HEADER.STEP": height 7.58, standoff -2.94, extent 11.43,-1.27 13.97,1.27
3D body "HEADER.STEP": height 7.58, standoff -2.94, extent 13.97,-1.27 16.51,1.27
3D body "HEADER.STEP": height 7.58, standoff -2.94, extent 16.51,-1.27 19.05,1.27
3D body "HEADER.STEP": height 7.58, standoff -2.94, extent 8.89,1.27 11.43,3.81
3D body "HEADER.STEP": height 7.58, standoff -2.94, extent 11.43,1.27 13.97,3.81
3D body "HEADER.STEP": height 7.58, standoff -2.94, extent 13.97,1.27 16.51,3.81
3D body "HEADER.STEP": height 7.58, standoff -2.94, extent 16.51,1.27 19.05,3.81
3D body "HEADER.STEP": height 7.58, standoff -2.94, extent 19.05,-1.27 21.59,1.27
3D body "HEADER.STEP": height 7.58, standoff -2.94, extent 21.59,-1.27 24.13,1.27
3D body "HEADER.STEP": height 7.58, standoff -2.94, extent 24.13,-1.27 26.67,1.27
3D body "HEADER.STEP": height 7.58, standoff -2.94, extent 26.67,-1.27 29.21,1.27
3D body "HEADER.STEP": height 7.58, standoff -2.94, extent 19.05,1.27 21.59,3.81
3D body "HEADER.STEP": height 7.58, standoff -2.94, extent 21.59,1.27 24.13,3.81
3D body "HEADER.STEP": height 7.58, standoff -2.94, extent 24.13,1.27 26.67,3.81
3D body "HEADER.STEP": height 7.58, standoff -2.94, extent 26.67,1.27 29.21,3.81
3D body "HEADER.STEP": height 7.58, standoff -2.94, extent 29.21,-1.27 31.75,1.27
3D body "HEADER.STEP": height 7.58, standoff -2.94, extent 31.75,-1.27 34.29,1.27
3D body "HEADER.STEP": height 7.58, standoff -2.94, extent 34.29,-1.27 36.83,1.27
3D body "HEADER.STEP": height 7.58, standoff -2.94, extent 36.83,-1.27 39.37,1.27
3D body "HEADER.STEP": height 7.58, standoff -2.94, extent 29.21,1.27 31.75,3.81
3D body "HEADER.STEP": height 7.58, standoff -2.94, extent 31.75,1.27 34.29,3.81
3D body "HEADER.STEP": height 7.58, standoff -2.94, extent 34.29,1.27 36.83,3.81
3D body "HEADER.STEP": height 7.58, standoff -2.94, extent 36.83,1.27 39.37,3.81
3D body "HEADER.STEP": height 7.58, standoff -2.94, extent 39.37,-1.27 41.91,1.27
3D body "HEADER.STEP": height 7.58, standoff -2.94, extent 39.37,1.27 41.91,3.81

## Pin HDR2X17/2.54mm-W [mm] "Connector; Header; 17x2 Position; Right Angle"
pads (34):
  rect 1.5x1.5 hole 0.9: 1(0,0)
  round 1.5 hole 0.9: 2(0,2.54) 3(2.54,0) 4(2.54,2.54) 5(5.08,0) 6(5.08,2.54) 7(7.62,0) 8(7.62,2.54) 9(10.16,0) 10(10.16,2.54) 11(12.7,0) 12(12.7,2.54) 13(15.24,0) 14(15.24,2.54) 15(17.78,0) 16(17.78,2.54) 17(20.32,0) 18(20.32,2.54) 19(22.86,0) 20(22.86,2.54) 21(25.4,0) 22(25.4,2.54) 23(27.94,0) 24(27.94,2.54) 25(30.48,0) 26(30.48,2.54) 27(33.02,0) 28(33.02,2.54) 29(35.56,0) 30(35.56,2.54) 31(38.1,0) 32(38.1,2.54) 33(40.64,0) 34(40.64,2.54)
Top Overlay:
  lines w0.2: -1.27,-1.905 -0.635,-1.27 ; -0.423,-2.54 -0.423,-5.927 0,-6.35 0.423,-5.927 0.423,-2.54 ; 2.117,-2.54 2.117,-5.927 2.54,-6.35 2.963,-5.927 2.963,-2.54 ; 4.657,-2.54 4.657,-5.927 5.08,-6.35 5.503,-5.927 5.503,-2.54 ; 7.197,-2.54 7.197,-5.927 7.62,-6.35 8.043,-5.927 8.043,-2.54 ; 9.737,-2.54 9.737,-5.927 10.16,-6.35 10.583,-5.927 10.583,-2.54 ; 12.277,-2.54 12.277,-5.927 12.7,-6.35 13.123,-5.927 13.123,-2.54 ; 14.817,-2.54 14.817,-5.927 15.24,-6.35 15.663,-5.927 15.663,-2.54 ; 17.357,-2.54 17.357,-5.927 17.78,-6.35 18.203,-5.927 18.203,-2.54 ; 19.897,-2.54 19.897,-5.927 20.32,-6.35 20.743,-5.927 20.743,-2.54 ; 22.437,-2.54 22.437,-5.927 22.86,-6.35 23.283,-5.927 23.283,-2.54 ; 24.977,-2.54 24.977,-5.927 25.4,-6.35 25.823,-5.927 25.823,-2.54 ; 27.517,-2.54 27.517,-5.927 27.94,-6.35 28.363,-5.927 28.363,-2.54 ; 30.057,-2.54 30.057,-5.927 30.48,-6.35 30.903,-5.927 30.903,-2.54 ; 32.597,-2.54 32.597,-5.927 33.02,-6.35 33.443,-5.927 33.443,-2.54 ; 35.137,-2.54 35.137,-5.927 35.56,-6.35 35.983,-5.927 35.983,-2.54 ; 37.677,-2.54 37.677,-5.927 38.1,-6.35 38.523,-5.927 38.523,-2.54 ; 40.217,-2.54 40.217,-5.927 40.64,-6.35 41.063,-5.927 41.063,-2.54 ; -1.27,-2.54 41.91,-2.54 41.91,-1.27 -1.27,-1.27 -1.27,-2.54
  text "2" at -2.032,2.032 h1.27
  text "1" at -2.032,-0.508 h1.27
  text "33" at 42.164,-0.508 h1.27
  text "34" at 42.164,2.032 h1.27
3D body "hdr2_17.stp": height 5.08, standoff -1, extent -1.27,-9.969 41.91,2.921

## Pin HDR2X18/2.54mm-S [mm] "Connector; Header; 18x2 Position"
pads (36):
  rect 1.5x1.5 hole 0.9: 1(0,0)
  round 1.5 hole 0.9: 2(0,2.54) 3(2.54,0) 4(2.54,2.54) 5(5.08,0) 6(5.08,2.54) 7(7.62,0) 8(7.62,2.54) 9(10.16,0) 10(10.16,2.54) 11(12.7,0) 12(12.7,2.54) 13(15.24,0) 14(15.24,2.54) 15(17.78,0) 16(17.78,2.54) 17(20.32,0) 18(20.32,2.54) 19(22.86,0) 20(22.86,2.54) 21(25.4,0) 22(25.4,2.54) 23(27.94,0) 24(27.94,2.54) 25(30.48,0) 26(30.48,2.54) 27(33.02,0) 28(33.02,2.54) 29(35.56,0) 30(35.56,2.54) 31(38.1,0) 32(38.1,2.54) 33(40.64,0) 34(40.64,2.54) 35(43.18,0) 36(43.18,2.54)
Top Overlay:
  lines w0.2: -1.27,-1.27 44.45,-1.27 44.45,3.81 -1.27,3.81 -1.27,-1.27
3D body "HEADER.STEP": height 7.58, standoff -2.94, extent 41.91,1.27 44.45,3.81
3D body "HEADER.STEP": height 7.58, standoff -2.94, extent 39.37,1.27 41.91,3.81
3D body "HEADER.STEP": height 7.58, standoff -2.94, extent 41.91,-1.27 44.45,1.27
3D body "HEADER.STEP": height 7.58, standoff -2.94, extent 39.37,-1.27 41.91,1.27
3D body "HEADER.STEP": height 7.58, standoff -2.94, extent 36.83,1.27 39.37,3.81
3D body "HEADER.STEP": height 7.58, standoff -2.94, extent 34.29,1.27 36.83,3.81
3D body "HEADER.STEP": height 7.58, standoff -2.94, extent 31.75,1.27 34.29,3.81
3D body "HEADER.STEP": height 7.58, standoff -2.94, extent 29.21,1.27 31.75,3.81
3D body "HEADER.STEP": height 7.58, standoff -2.94, extent 36.83,-1.27 39.37,1.27
3D body "HEADER.STEP": height 7.58, standoff -2.94, extent 34.29,-1.27 36.83,1.27
3D body "HEADER.STEP": height 7.58, standoff -2.94, extent 31.75,-1.27 34.29,1.27
3D body "HEADER.STEP": height 7.58, standoff -2.94, extent 29.21,-1.27 31.75,1.27
3D body "HEADER.STEP": height 7.58, standoff -2.94, extent 26.67,1.27 29.21,3.81
3D body "HEADER.STEP": height 7.58, standoff -2.94, extent 24.13,1.27 26.67,3.81
3D body "HEADER.STEP": height 7.58, standoff -2.94, extent 21.59,1.27 24.13,3.81
3D body "HEADER.STEP": height 7.58, standoff -2.94, extent 19.05,1.27 21.59,3.81
3D body "HEADER.STEP": height 7.58, standoff -2.94, extent 26.67,-1.27 29.21,1.27
3D body "HEADER.STEP": height 7.58, standoff -2.94, extent 24.13,-1.27 26.67,1.27
3D body "HEADER.STEP": height 7.58, standoff -2.94, extent 21.59,-1.27 24.13,1.27
3D body "HEADER.STEP": height 7.58, standoff -2.94, extent 19.05,-1.27 21.59,1.27
3D body "HEADER.STEP": height 7.58, standoff -2.94, extent 16.51,1.27 19.05,3.81
3D body "HEADER.STEP": height 7.58, standoff -2.94, extent 13.97,1.27 16.51,3.81
3D body "HEADER.STEP": height 7.58, standoff -2.94, extent 11.43,1.27 13.97,3.81
3D body "HEADER.STEP": height 7.58, standoff -2.94, extent 8.89,1.27 11.43,3.81
3D body "HEADER.STEP": height 7.58, standoff -2.94, extent 16.51,-1.27 19.05,1.27
3D body "HEADER.STEP": height 7.58, standoff -2.94, extent 13.97,-1.27 16.51,1.27
3D body "HEADER.STEP": height 7.58, standoff -2.94, extent 11.43,-1.27 13.97,1.27
3D body "HEADER.STEP": height 7.58, standoff -2.94, extent 8.89,-1.27 11.43,1.27
3D body "HEADER.STEP": height 7.58, standoff -2.94, extent 6.35,1.27 8.89,3.81
3D body "HEADER.STEP": height 7.58, standoff -2.94, extent 3.81,1.27 6.35,3.81
3D body "HEADER.STEP": height 7.58, standoff -2.94, extent 1.27,1.27 3.81,3.81
3D body "HEADER.STEP": height 7.58, standoff -2.94, extent -1.27,1.27 1.27,3.81
3D body "HEADER.STEP": height 7.58, standoff -2.94, extent 6.35,-1.27 8.89,1.27
3D body "HEADER.STEP": height 7.58, standoff -2.94, extent 3.81,-1.27 6.35,1.27
3D body "HEADER.STEP": height 7.58, standoff -2.94, extent 1.27,-1.27 3.81,1.27
3D body "HEADER.STEP": height 7.58, standoff -2.94, extent -1.27,-1.27 1.27,1.27